# Altium footprint library 1935200.PcbLib: 2 footprints
Each footprint in its own frame and in the unit in brackets; x right, y up, seen from the top. Pads: shape width x height; smd on the part's side, far side on the other; paste and mask are expansions set on the pad; w line width, h text height; cw(c..) or ccw(c..) is an arc to the next point about the centre after c.
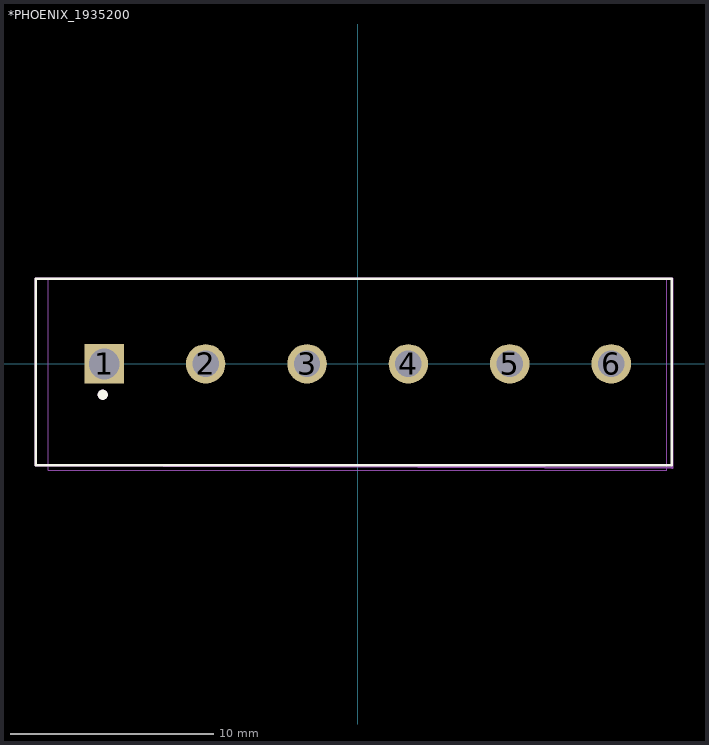
[diagram p0: the footprints below, top view; thin cyan lines are the x and y axes]

## *PHOENIX_1935200 [mm]
pads (6):
  rect 1.95x1.95 hole 1.524: 1(-12.5,0)
  round 1.95 hole 1.3: 2(-7.5,0) 3(-2.5,0) 4(2.5,0) 5(7.5,0) 6(12.5,0)
Top Overlay:
  circle w0.3: c-12.573,-1.524 r0.1
  lines w0.127: -15.875,-5 15.494,-5 15.494,4.191 -15.875,4.191 -15.875,-5
Mechanical 4:
  circle w0.3: c-12.573,-1.524 r0.1
  circle w0.3: c-12.573,-1.524 r0.1
  lines w0.127: -15.762,-5 15.508,-5.127 ; 15.508,-5.127 -15.875,-5 -15.875,4.191 15.508,4.191 15.508,-5.127
Mechanical 16:
  lines w0.05: -15.25,-5.25 -15.25,4.25 15.25,4.25 15.25,-5.25 -15.25,-5.25
3D body "c-282836-6-h-3d.stp": height 3.42, standoff -10.08, extent -15.6,-4.136 15,4.064

## PCBComponent_1 [mm]